# Altium schematic symbol library Diodos.SchLib: 5 symbols
Pins are listed as number, name and electrical type; pins without a type are passive.

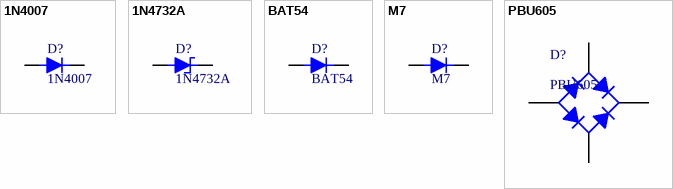
[diagram p0: symbols 1N4007 to PBU605]

## 1N4007
designator D?
DO-41 SHOTKY DIODE 1A 700V
footprint DO-41-Plastic (Diode, Axial; Body 4.1 x 2.6 mm (LxDia. max), Lead Dia. 1.14 mm (max), Lead Spacing 10.16 mm; 3D Wagner Bernardo)
pins: A, K

## 1N4732A
designator D?
4,7V 1W Silicon Zener Diode; Datasheet: http://pdf.datasheetcatalog.com/datasheet_pdf/bkc-international-electronics/1N4728_to_1N973B-1.pdf
footprint DO-41-Glass (Diode, Axial; Body 4.1 x 2.6 mm (LxDia. max), Lead Dia. 0.86 mm (max), Lead Spacing 7.62 mm; 3D Julien THIEREN)
pins: A, K

## BAT54
designator D?
Diode Schottky 30V 200mA Surface Mount SOT-23-3 (TO-236)
footprint BAT54 (SOT23-3)
pins: A, K

## M7
designator D?
1A Rectifier Diodes
footprint DO-214AC SMA
pins: A, K

## PBU605
designator D?
Rectifier Bridge 600V 6A
footprint Rectifier Bridge (PBU605 - 600V 6A)
pins: 1 A, 2 C, 3 C, 4 K